# Altium footprint library PcbLib1.PcbLib: 2 footprints
Each footprint in its own frame and in the unit in brackets; x right, y up, seen from the top. Pads: shape width x height; smd on the part's side, far side on the other; paste and mask are expansions set on the pad; w line width, h text height; cw(c..) or ccw(c..) is an arc to the next point about the centre after c.
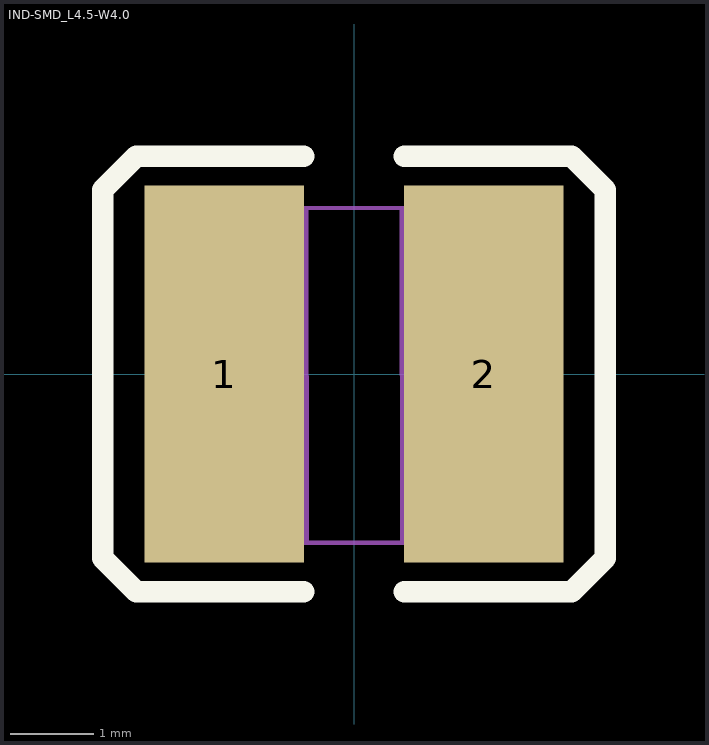
[diagram p0: the footprints below, top view; thin cyan lines are the x and y axes]

## IND-SMD_L4.5-W4.0 [mil]
pads (2):
  rect 74.8x177.2 smd: 1(-61,0) 2(61,0)
Top Overlay:
  lines w10: -23.6,-102.4 -102.4,-102.4 -118.1,-86.6 -118.1,86.6 -102.4,102.4 -23.6,102.4 ; 23.6,-102.4 102.4,-102.4 118.1,-86.6 118.1,86.6 102.4,102.4 23.6,102.4
Mechanical 7:
  lines w2: -82.84,1.24 ccw(c-81,-0.6) -83.6,-0.6 ccw(c-80.2,-0.6) -82.6,-3 -81.9,-3.7 -70.5,-3.5 -71.6,-7.7 -73.4,-11.8 -76.6,-15.4 -83.4,-20.6 ccw(c-79.5,-24.5) -85,-24.5 -85,-26.2 -84.7,-27.5 -81.3,-36.8 -77.1,-44.7 -72.2,-52.2 -66.6,-59.4 -60.2,-66.1 -52.8,-72.2 -45.1,-77.2 -42.4,-78.6 -39.4,-79.3 39.6,-79.3 45.3,-77.3 53.3,-72.2 64.2,-62.5 71.2,-54.1 81.7,-35.7 84.9,-26.1 85,-23.8 84.6,-22.2 83.9,-20.7 82.3,-19.1 77.6,-15.9 74.8,-13.2 72.8,-10.1 71.3,-6.5 70.9,-3.7 78.1,-3.7 ccw(c78.1,-1.5) 80.3,-1.5 ; -82.8,1.2 -82.5,1.5 cw(c-80.5,-0.5) -80.5,2.3 -70.6,2.3 ccw(c-83.4,2.3) -74.35,11.35 ; -74.3,11.4 -79.1,16.2 -82.5,18.5 cw(c-76.9,24.1) -84.8,24.1 -84.8,25.7 -81.2,35.7 -74.4,47.7 -66.9,58.2 -57.4,67.2 -48.4,73.9 -43.6,77.1 -38.6,78.1 38.6,78.1 42.5,77.4 44.5,76.2 52,71.9 58.2,66.8 60.8,64.4 64.2,61.2 69.6,55 74.4,48.3 75.7,46.1 77.1,43.6 78.3,41.6 81.8,34.2 84.2,27.5 84.6,26.2 85,24.6 85,22.6 84.7,21.1 83.9,19.5 82.2,17.9 77.7,14.9 74.8,12 72.8,8.8 71.3,5.4 70.5,2.2 78,2.2 cw(c78,-0.2) 80.4,-0.2 80.4,-1.5
Mechanical 8:
  region: -82.6,-79.5 -83,-80.8 -84,-81.7 -85.3,-81.8 -86.5,-81.3 -87.3,-80.2 -87.3,-78.8 -86.5,-77.7 -85.3,-77.2 -84,-77.4 -83,-78.2
Mechanical 9:
  region: 21.4,78.2 21.7,-79.5 39.6,-79.3 45.2,-77.3 53.2,-72.4 64.2,-62.5 71.1,-54.3 81.5,-36 84.8,-26.5 85,-23.6 83.8,-20.6 77.4,-15.9 74.8,-13.2 72.9,-10.1 71.3,-6.6 70.5,2.2 74.6,11.6 77.7,15 82.2,17.8 82.2,17.9 83.8,19.9 84.7,22.2 85.1,24.7 82,33.8 78.1,42 71.1,53.1 62.7,62.6 51.9,72 42.6,77.3 38.8,78.2
  region: -21.3,-79.5 -21.6,78.2 -39.5,78 -45.1,76 -53.1,71 -64.2,61.2 -71.1,52.9 -81.5,34.6 -84.7,25.2 -84.9,22.3 -83.8,19.3 -77.4,14.6 -74.8,11.9 -72.9,8.8 -71.2,5.3 -70.5,-3.5 -74.5,-12.9 -77.7,-16.3 -82.1,-19.1 -82.2,-19.2 -83.7,-21.2 -84.7,-23.5 -85,-26 -81.9,-35.1 -78.1,-43.3 -71,-54.4 -62.6,-63.9 -51.8,-73.3 -42.5,-78.6 -38.7,-79.5

## PCBComponent_1 [mil]